# Altium schematic symbol library 2020-12-12_21-13-15.SchLib: 2 symbols
Pins are listed as number, name and electrical type; pins without a type are passive.

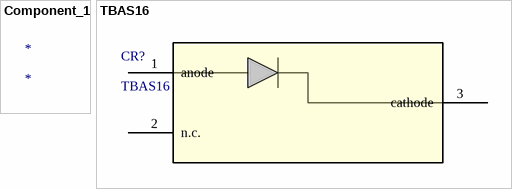
[diagram p0: symbols Component_1 to TBAS16]

## Component_1
designator *

## TBAS16
designator CR?
No Description Available; Built_By: EMA_Kyle; Vendor: Toshiba; SourceLibrary: Toshiba_2018-09-20; Type: DEV; Copyright: Copyright (C) 2016 Accelerated Designs. All rights reserved; Manufacturer_Part_Number: TBAS16; RefDes: RefDes
footprint SOT23_TOS
pins: 1 anode, 2 n.c., 3 cathode